# EAGLE library part IC_PCA9533 (library dp_devices.v6)
PCA9533 4-bit I2C LED dimmer
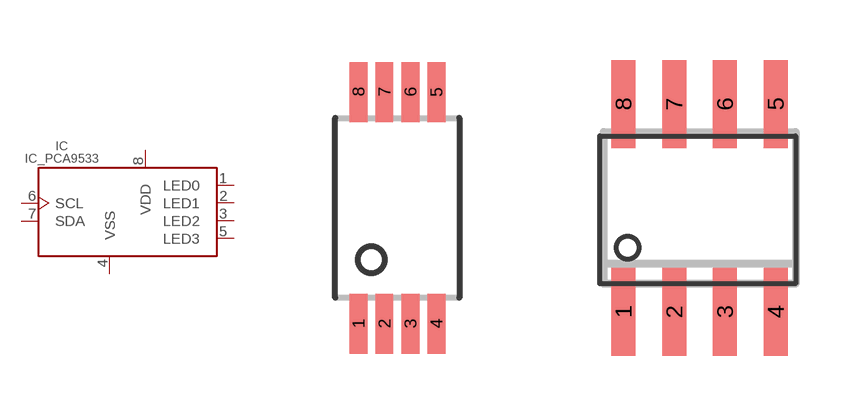
[diagram p187: symbol with the pads of TSSOP-8; footprints TSSOP-8, SOIC-8]

Designator prefix IC

## IC_PCA9533TSSOP  [TSSOP-8]
1  LED0  oc
2  LED1  oc
3  LED2  oc
4  VSS  sup
5  LED3  oc
6  SCL  in
7  SDA
8  VDD  sup

## IC_PCA9533SOIC  [SOIC-8]
Pads as for TSSOP-8

## Footprint TSSOP-8 (pad centres in mm)
smd 0.45 x 1.5: 1 -0.975,-2.9; 2 -0.325,-2.9; 3 0.325,-2.9; 4 0.975,-2.9; 5 0.975,2.9; 6 0.325,2.9; 7 -0.325,2.9; 8 -0.975,2.9

## Footprint SOIC-8 (pad centres in mm)
smd 0.6 x 2.2: 1 -1.905,-2.6; 2 -0.635,-2.6; 3 0.635,-2.6; 4 1.905,-2.6; 5 1.905,2.6; 6 0.635,2.6; 7 -0.635,2.6; 8 -1.905,2.6